# Altium footprint library Downloads.PcbLib: 1 footprints
Each footprint in its own frame and in the unit in brackets; x right, y up, seen from the top. Pads: shape width x height; smd on the part's side, far side on the other; paste and mask are expansions set on the pad; w line width, h text height; cw(c..) or ccw(c..) is an arc to the next point about the centre after c.
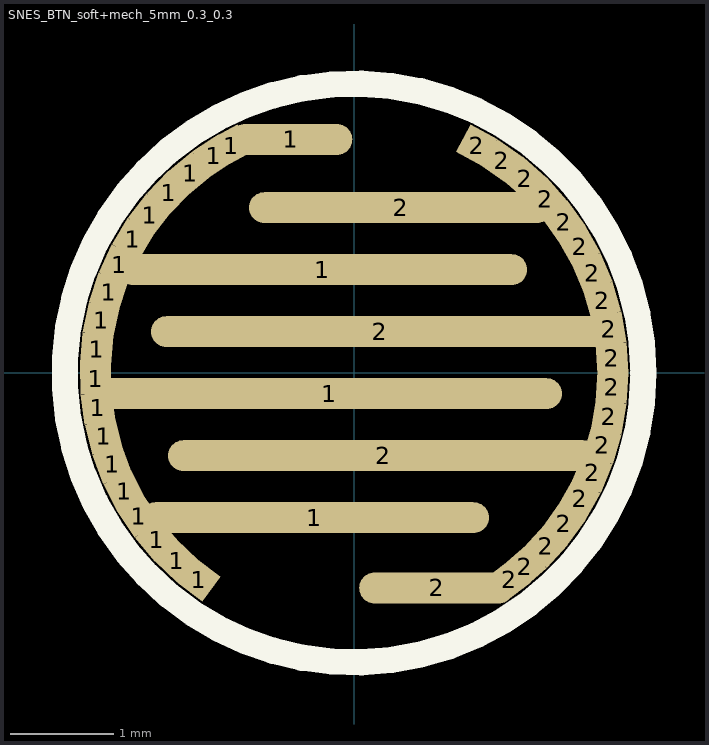
[diagram p0: the footprint, top view; thin cyan lines are the x and y axes]

## SNES_BTN_soft+mech_5mm_0.3_0.3 [mm]
pads (46):
  rect 0.3x0.3 smd rot 1.24: 1(-2.499,-0.054)
  rect 0.3x0.3 smd rot 174.75: 1(-2.49,0.229)
  rect 0.3x0.3 smd rot 7.73: 1(-2.477,-0.336)
  rect 0.3x0.3 smd rot 168.27: 1(-2.448,0.508)
  rect 0.3x0.3 smd rot 14.21: 1(-2.423,-0.614)
  rect 0.3x0.3 smd rot 161.78: 1(-2.375,0.782)
  rect 0.3x0.3 smd rot 20.7: 1(-2.339,-0.884)
  rect 0.3x0.3 smd rot 155.29: 1(-2.271,1.045)
  rect 0.3x0.3 smd rot 27.18: 1(-2.224,-1.142)
  rect 0.3x0.3 smd rot 148.81: 1(-2.139,1.295)
  rect 0.3x0.3 smd rot 33.67: 1(-2.081,-1.386)
  rect 0.3x0.3 smd rot 142.32: 1(-1.979,1.528)
  rect 0.3x0.3 smd rot 40.16: 1(-1.911,-1.612)
  rect 0.3x0.3 smd rot 135.84: 1(-1.793,1.742)
  rect 0.3x0.3 smd rot 46.64: 1(-1.716,-1.818)
  rect 0.3x0.3 smd rot 129.35: 1(-1.585,1.933)
  rect 0.3x0.3 smd rot 53.13: 1(-1.5,-2)
  rect 0.3x0.3 smd rot 122.86: 1(-1.357,2.1)
  rect 0.3x0.3 smd rot 118.36: 1(-1.187,2.2)
  rrect100% 1.187x0.3 smd: 1(-0.61,2.26)
  rrect100% 3.377x0.3 smd: 1(-0.383,-1.4)
  rrect100% 3.968x0.3 smd: 1(-0.307,1)
  rrect100% 4.506x0.3 smd: 1(-0.239,-0.2)
  rrect100% 4.434x0.3 smd: 2(0.251,0.4)
  rrect100% 4.169x0.3 smd: 2(0.284,-0.8)
  rrect100% 2.938x0.3 smd: 2(0.452,1.6)
  rrect100% 1.5x0.3 smd: 2(0.8,-2.08)
  rect 0.3x0.3 smd rot 61.64: 2(1.187,2.2)
  rect 0.3x0.3 smd rot 55.16: 2(1.428,2.052)
  rect 0.3x0.3 smd rot 126.87: 2(1.5,-2)
  rect 0.3x0.3 smd rot 48.67: 2(1.651,1.877)
  rect 0.3x0.3 smd rot 131.38: 2(1.652,-1.876)
  rect 0.3x0.3 smd rot 42.18: 2(1.852,1.679)
  rect 0.3x0.3 smd rot 137.86: 2(1.854,-1.677)
  rect 0.3x0.3 smd rot 35.7: 2(2.03,1.459)
  rect 0.3x0.3 smd rot 144.35: 2(2.031,-1.457)
  rect 0.3x0.3 smd rot 29.21: 2(2.182,1.22)
  rect 0.3x0.3 smd rot 150.83: 2(2.183,-1.218)
  rect 0.3x0.3 smd rot 22.72: 2(2.306,0.966)
  rect 0.3x0.3 smd rot 157.32: 2(2.307,-0.964)
  rect 0.3x0.3 smd rot 16.24: 2(2.4,0.699)
  rect 0.3x0.3 smd rot 163.81: 2(2.401,-0.697)
  rect 0.3x0.3 smd rot 9.75: 2(2.464,0.423)
  rect 0.3x0.3 smd rot 170.29: 2(2.464,-0.422)
  rect 0.3x0.3 smd rot 3.27: 2(2.496,0.142)
  rect 0.3x0.3 smd rot 176.78: 2(2.496,-0.14)
F.SilkS:
  circle w0.254: c0,0 r2.8